# Altium schematic symbol library ESP32-S3-DevKitC-1-N32R16V.SchLib: 1 symbol
Pins are listed as number, name and electrical type; pins without a type are passive.

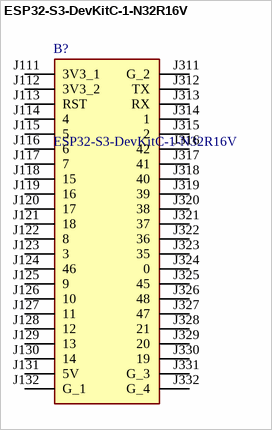
[diagram p0: symbol ESP32-S3-DevKitC-1-N32R16V]

## ESP32-S3-DevKitC-1-N32R16V
designator B?
Multiprotocol Development Tools The ESP32-S3-DevKitC-1 is an entry-level development board equipped with ESP32-S3-WROOM-1, ESP32-S3-WROOM-1U, or ESP32-S3-WROOM-2, a general-purpose Wi-Fi + Bluetooth Low Energy MCU module that integrates complete Wi-Fi and Bluetooth Low Energy funct; Manufacturer_Name: Espressif Systems; Geometry.Height: 5mm; Manufacturer_Part_Number: ESP32-S3-DevKitC-1-N32R16V; Mouser Part Number: 356-32S3DKTC1N32R16V; Mouser Price/Stock: https://www.mouser.co.uk/ProductDetail/Espressif-Systems/ESP32-S3-DevKitC-1-N32R16V?qs=sqEgtWRSLJ3pTWIVKUeIew%3D%3D; Arrow Part Number: *; Arrow Price/Stock: *; Datasheet Link: https://docs.espressif.com/projects/esp-dev-kits/en/latest/esp32s3/esp-dev-kits-en-master-esp32s3.pdf
footprint ESP32S3DevKitC1N32R16V
pins: J111 3V3_1, J112 3V3_2, J113 RST, J114 4, J115 5, J116 6, J117 7, J118 15, J119 16, J120 17, J121 18, J122 8, J123 3, J124 46, J125 9, J126 10, J127 11, J128 12, J129 13, J130 14, J131 5V, J132 G_1, J311 G_2, J312 TX, J313 RX, J314 1, J315 2, J316 42, J317 41, J318 40, J319 39, J320 38, J321 37, J322 36, J323 35, J324 0, J325 45, J326 48, J327 47, J328 21, J329 20, J330 19, J331 G_3, J332 G_4